# Altium footprint library Count-.PcbLib: 34 footprints (part 1 of 3)
Each footprint in its own frame and in the unit in brackets; x right, y up, seen from the top. Pads: shape width x height; smd on the part's side, far side on the other; paste and mask are expansions set on the pad; w line width, h text height; cw(c..) or ccw(c..) is an arc to the next point about the centre after c.
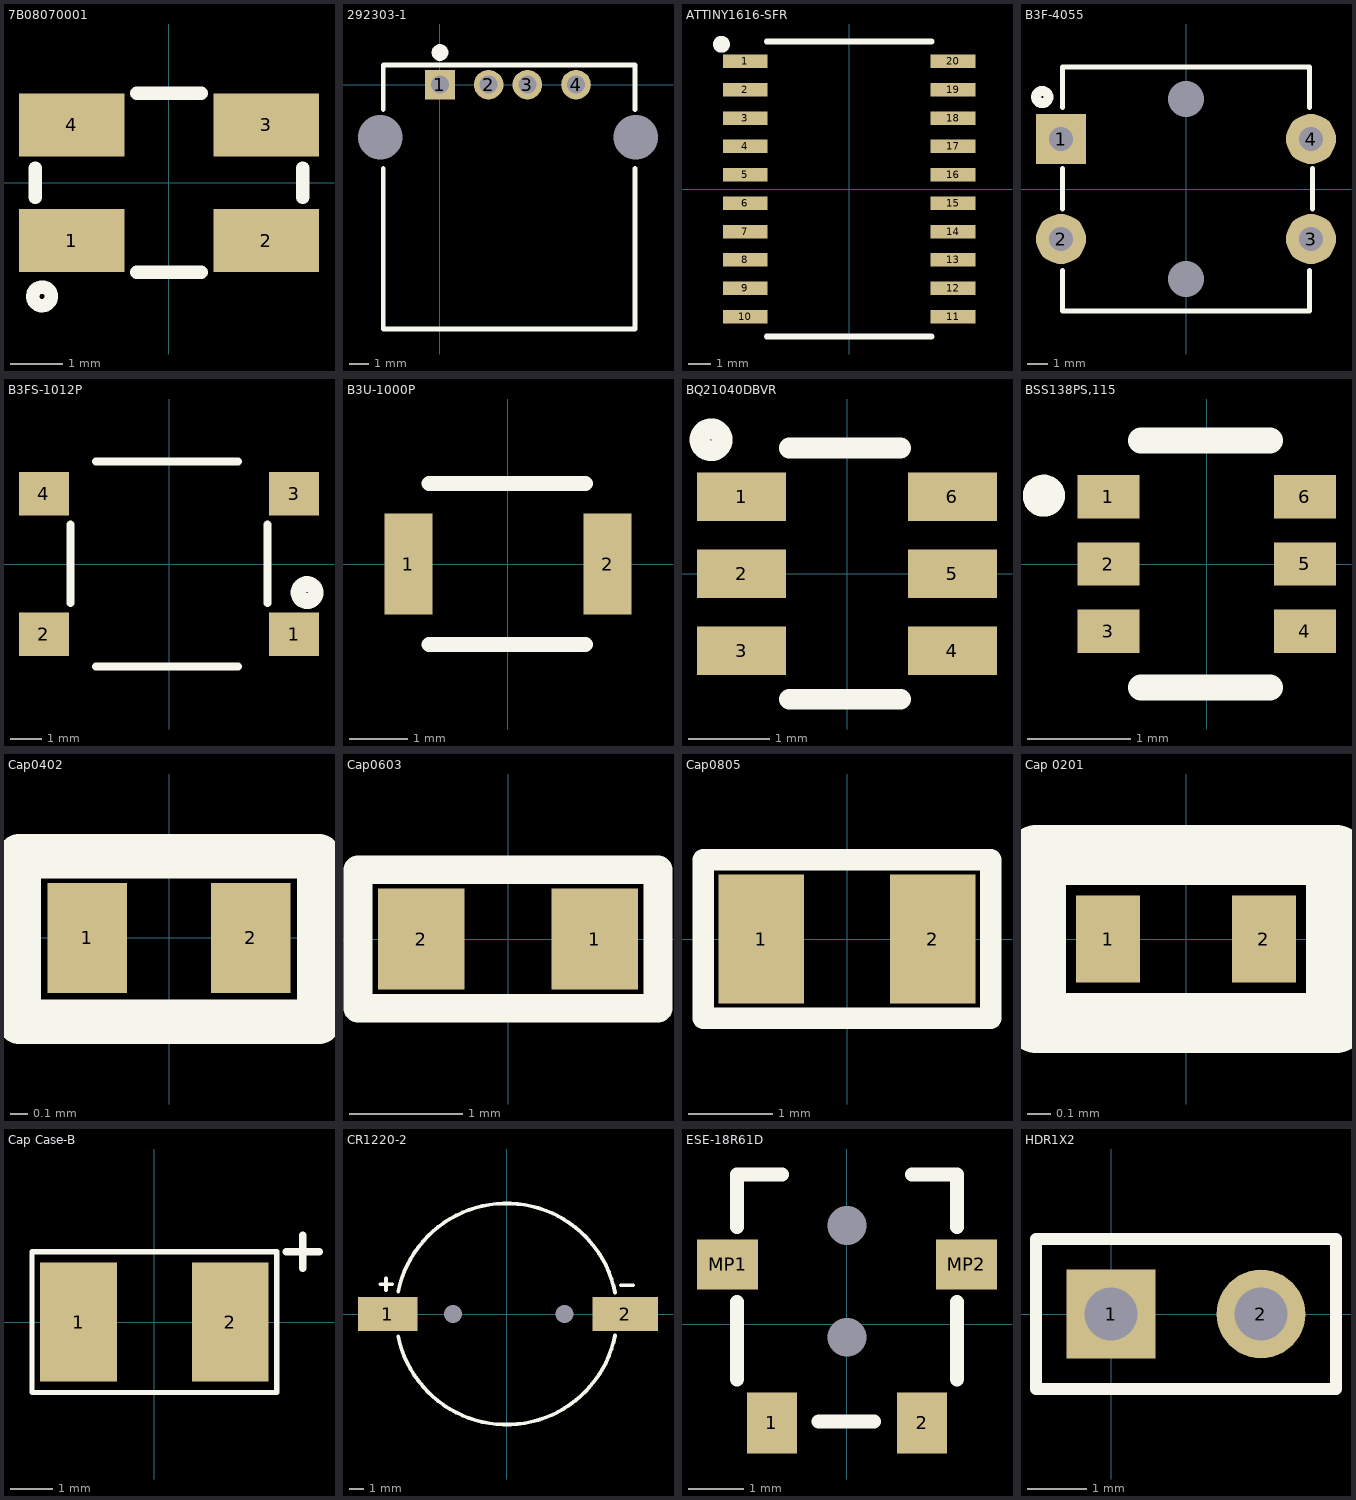
[diagram p0: the footprints below, top view; thin cyan lines are the x and y axes]

## 7B08070001 [mm]
pads (4):
  rect 2x1.2 smd: 1(-1.85,-1.1) 2(1.85,-1.1) 3(1.85,1.1) 4(-1.85,1.1)
Top Overlay:
  circle w0.254: c-2.413,-2.159 r0.178
  lines w0.254: -2.54,-0.279 -2.54,0.279 ; -0.61,-1.702 0.61,-1.702 ; -0.61,1.702 0.61,1.702 ; 2.54,-0.279 2.54,0.279
3D body "User Library-Crystal.step": height 0.91, standoff -0.04, extent -2.475,-1.6 2.525,1.6

## 292303-1 [mm] "USB-A (USB TYPE-A) USB 2.0 Receptacle Connector 4 Position Through Hole, Right Angle"
pads (6):
  rect 1.524x1.524 hole 0.92: 1(0,0)
  round 1.524 hole 0.92: 2(2.5,0) 3(4.5,0) 4(7,0)
  round 0 hole 2.3 unplated: MH1(-3.07,-2.71) MH2(10.07,-2.71)
Top Overlay:
  circle w0.5: c0,1.651 r0.18
  lines w0.254: -2.921,-4.318 -2.921,-12.573 10.033,-12.573 10.033,-4.318 ; -2.921,-1.27 -2.921,1.016 10.033,1.016 10.033,-1.27
3D body "292303-1--3DModel-STEP-56544.STEP": height 7.71, standoff -3.77, extent -4.444,-13.022 11.556,0.978

## ATTINY1616-SFR [mm]
pads (20):
  rect 2x0.6 smd: 1(-4.65,5.715) 2(-4.65,4.445) 3(-4.65,3.175) 4(-4.65,1.905) 5(-4.65,0.635) 6(-4.65,-0.635) 7(-4.65,-1.905) 8(-4.65,-3.175) 9(-4.65,-4.445) 10(-4.65,-5.715) 11(4.65,-5.715) 12(4.65,-4.445) 13(4.65,-3.175) 14(4.65,-1.905) 15(4.65,-0.635) 16(4.65,0.635) 17(4.65,1.905) 18(4.65,3.175) 19(4.65,4.445) 20(4.65,5.715)
Top Overlay:
  circle w0.5: c-5.715,6.477 r0.127
  lines w0.254: -3.683,-6.604 3.683,-6.604 ; -3.683,6.604 3.683,6.604
3D body "SOIC20_12P8X7P5.step": height 2.64, standoff 0, extent -5.321,-6.502 5.321,6.502

## B3F-4055 [mm]
pads (6):
  rect 2.5x2.5 hole 1.2: 1(-6.25,2.5)
  round 2.5 hole 1.2: 2(-6.25,-2.5) 3(6.25,-2.5) 4(6.25,2.5)
  round 0 hole 1.8 unplated: MH1(0,4.5) MH2(0,-4.5)
Top Overlay:
  circle w0.5: c-7.188,4.597 r0.306
  lines w0.254: -6.172,-4.089 -6.172,-6.096 6.172,-6.096 6.172,-4.089 ; -6.172,-0.994 -6.172,1.012 ; -6.172,4.089 -6.172,6.096 6.172,6.096 6.172,4.089 ; 6.328,-0.994 6.328,1.012
3D body "B3F-4055--3DModel-STEP-273799.STEP": height 10, standoff -3.5, extent -6.9,-6 6.9,6

## B3FS-1012P [mm]
pads (4):
  rect 1.6x1.4 smd: 1(4,-2.25) 2(-4,-2.25) 3(4,2.25) 4(-4,2.25)
Top Overlay:
  circle w0.5: c4.42,-0.914 r0.275
  lines w0.254: -3.15,-1.245 -3.15,1.27 ; -2.337,-3.277 2.21,-3.277 ; -2.337,3.277 2.21,3.277 ; 3.15,-1.245 3.15,1.27
3D body "b3fs-1000.stp": height 3.1, standoff 0, extent -4,-3.15 4,3.15

## B3U-1000P [mm] "SWITCH TACTILE SPST-NO 0.05A 12V"
pads (2):
  rect 0.82x1.72 smd: 1(-1.7,0) 2(1.7,0)
Top Overlay:
  lines w0.254: -1.346,-1.372 0,-1.372 1.321,-1.372 ; -1.346,1.372 0,1.372 1.321,1.372
3D body "User Library-OMRON B3U1000P.step": height 1.6, standoff 0, extent -2,-1.263 2,1.237

## BQ21040DBVR [mm]
pads (6):
  rect 1.1x0.6 smd: 1(-1.3,0.95) 2(-1.3,0) 3(-1.3,-0.95) 4(1.3,-0.95) 5(1.3,0) 6(1.3,0.95)
Top Overlay:
  circle w0.254: c-1.676,1.651 r0.137
  lines w0.254: -0.711,-1.549 0.66,-1.549 ; -0.711,1.549 0.66,1.549
3D body "User Library-SOT23-6-2.step": height 1.37, standoff -0.08, extent -1.4,-1.45 1.4,1.45

## BSS138PS,115 [mm]
pads (6):
  rect 0.6x0.42 smd: 1(-0.95,0.65) 2(-0.95,0) 3(-0.95,-0.65) 4(0.95,-0.65) 5(0.95,0) 6(0.95,0.65)
Top Overlay:
  circle w0.254: c-1.575,0.66 r0.076
  lines w0.254: -0.635,-1.194 0.61,-1.194 ; -0.635,1.194 0.61,1.194
3D body "User Library-SOT363-2.step": height 1.09, standoff -0.01, extent -1.2,-1.1 1.2,1.1

## Cap0402 [mil]
pads (2):
  rect 18x25 smd: 1(-18.5,0) 2(18.5,0)
Top Overlay:
  lines w10: -34,-19 -34,18.5 34,18.5 34,-19 -34,-19
3D body "User Library-Capacitor 0402.step": height 18.5, standoff -1.18, extent -19.68,-9.84 19.7,9.85

## Cap0603 [mil]
pads (2):
  rect 30x35 smd: 1(30,0) 2(-30,0)
Top Overlay:
  lines w10: -52,-24 52,-24 52,24 -52,24 -52,-24
3D body "User Library-CAPC1608X09.step": height 34.25, standoff -1.18, extent -31.49,-15.74 31.51,15.76

## Cap0805 [mil] "SMD 0805"
pads (2):
  rect 40x60 smd: 1(-40,0) 2(40,0)
Top Overlay:
  lines w10: -67,-37 -67,37 67,37 67,-37 -67,-37
3D body "User Library-0805 SMD Capacitor.step": height 30, standoff -0.79, extent -39.36,-24.6 39.38,24.61

## Cap 0201 [mm]
pads (2):
  rect 0.27x0.37 smd: 1(-0.33,0) 2(0.33,0)
Top Overlay:
  lines w0.254: -0.635,-0.356 0.635,-0.356 0.635,0.356 -0.635,0.356 -0.635,-0.356
3D body "GRM033R60J104KE19D--3DModel-STEP-56544.STEP": height 0.21, standoff -0.09, extent -0.3,-0.165 0.3,0.165

## Cap Case-B [mil] "Case-B"
pads (2):
  rect 70.87x110 smd: 1(-70,0) 2(70,0)
Top Overlay:
  lines w5: -113,-65 113,-65 113,65 -113,65 -113,-65
  lines w7: 122,65 152,65 ; 137,50 137,80
3D body "User Library-AVX_BCASE.step": height 76.93, standoff -2.99, extent -72.84,-57.68 72.83,57.68

## CR1220-2 [mm]
pads (4):
  rect 4x2.3 smd: 1(-8,0)
  rect 4.4x2.3 smd: 2(8,0)
  round 0 hole 1.22: MH1(-3.6,0) MH2(3.9,0)
Top Overlay:
  lines w0.254: -8.502,2.007 -7.689,2.007 ; -8.121,1.6 -8.121,2.413 ; -7.297,-1.501 ccw(c0,0) 7.306,-1.456 ; -7.297,1.501 cw(c0,0) 7.306,1.456 ; 7.703,1.93 8.516,1.93
3D body "qj_cr1220-2.stp": height 4, standoff -0.5, extent -9.8,-7.45 9.9,7.45

## ESE-18R61D [mm]
pads (6):
  rect 0.9x1.1 smd: 1(-1.35,-1.775) 2(1.35,-1.775)
  round 0 hole 0.7 unplated: MH1(0,1.775) MH2(0,-0.235)
  rect 1.1x0.9 smd: MP1(-2.15,1.075) MP2(2.15,1.075)
Top Overlay:
  lines w0.254: -1.981,-0.991 -1.981,0.397 ; -1.981,1.753 -1.981,2.692 -1.168,2.692 ; -0.508,-1.753 0.483,-1.753 ; 1.168,2.692 1.981,2.692 1.981,1.753 ; 1.981,-0.991 1.981,0.397
3D body "ese18l61d_asm.stp": height 1.23, standoff -0.4, extent -2.491,-2.126 2.509,4.642

## HDR1X2 [mm] "CONN HEADER VERT 2POS 2.54MM"
pads (2):
  rect 1.5x1.5 hole 0.9: 1(0,0)
  round 1.5 hole 0.9: 2(2.54,0)
Top Overlay:
  lines w0.2: -1.27,-1.27 -1.27,1.27 3.81,1.27 3.81,-1.27 -1.27,-1.27
3D body "User Library-Header1x2.STEP": height 8.44, standoff -2.54, extent -1.27,-1.27 3.81,1.27